# Altium schematic symbol library UCC27524D.SchLib: 1 symbol
Pins are listed as number, name and electrical type; pins without a type are passive.

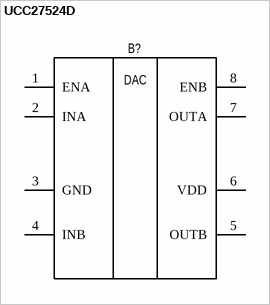
[diagram p0: symbol UCC27524D]

## UCC27524D
designator B?  (value not drawn)
Texas Instruments UCC27524D Dual Low Side MOSFET Power Driver, 5A, 4.5  18 V 8-Pin, SOIC; Geometry.Height: 1.75mm; Manufacturer_Name: Texas Instruments; Manufacturer_Part_Number: UCC27524D; Mouser Part Number: 595-UCC27524D; Mouser Price/Stock: https://www.mouser.co.uk/ProductDetail/Texas-Instruments/UCC27524D?qs=iuXUNOC6nYfyi9ut48diIw%3D%3D; Arrow Part Number: UCC27524D; Arrow Price/Stock: https://www.arrow.com/en/products/ucc27524d/texas-instruments?region=europe; Datasheet Link: http://uk.rs-online.com/web/p/products/7620418
footprint SOIC127P600X175-8N
pins: 1 ENA, 2 INA, 3 GND, 4 INB, 5 OUTB, 6 VDD, 7 OUTA, 8 ENB
text: DAC